# Altium schematic symbol library MyLibrary.SCHLIB: 89 symbols (part 2 of 3)
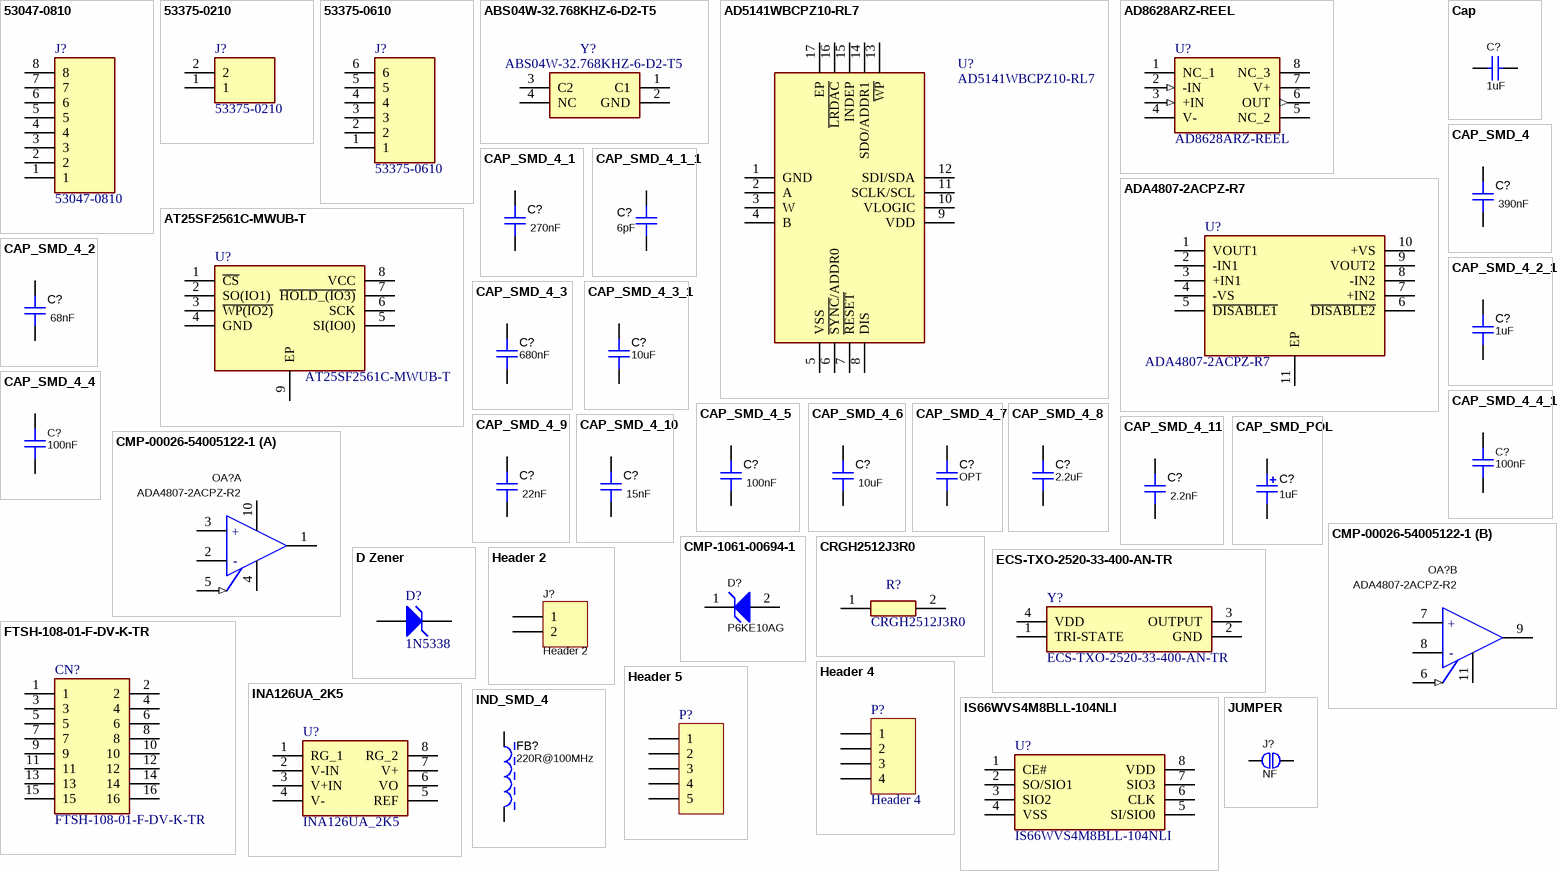
[diagram p3: symbols 53047-0810 to JUMPER]

## D Zener
designator D?, comment 1N5338
Zener Diode Single 5.1V 5% 1.5Ohm 5000mW 2-Pin Case 017AA-01 T/R / DIODE ZENER 5.1V 5W AXIAL; Manufacturer: onsemi; Manufacturer Part Number: 1N5338BRLG; Manufacturer Lifecycle Status: ACTIVE; ESD Protection: Yes; Forward Voltage: 1.2V; Impedance: 1.5Ω; Material: Plastic; Max Reverse Leakage Current: 1µA; Number of Elements: 1; Polarity: Unidirectional; Test Current: 240mA; Published: 8-Jun-2000; LatestRevisionDate: 17-Jul-2002; LatestRevisionNote: Re-released for DXP Platform.; PackageReference: DIODE-0.7; Publisher: Altium Limited; PackageDescription: Diode, Thru-Hole; 2 Leads; 0.7 in Pin Spacing; Value: 1N5338; Supplier 1: Mouser; Supplier Part Number 1: 863-1N5338BRLG; RoHS: Compliant; Category: Zener Diodes; Stock 1: 48065; Pricing 1: 1=0,53, 10=0,417, 50=0,417, 100=0,277, 1000=0,168, 10000=0,15 (USD); Case/Package: Axial; China RoHS: Non-Compliant; Contact Plating: Tin; Element Configuration: Single; Halogen Free: Halogen Free; Height: 3.68mm; Lead Free: Lead Free; Length: 8.89mm; Lifecycle Status: Production; Max Operating Temperature: 200°C; Max Power Dissipation: 5W; Min Operating Temperature: -65°C; Number of Pins: 0; Number of Terminals: 2; Packaging: Tape and Reel; Peak Reverse Current: 1µA; Power Dissipation: 5W; Power Rating: 5W; Radiation Hardening: No; REACH SVHC: No; Reference Voltage: 5.1V; Schedule B: 8541100050, 8541100050|8541100050|8541100050|8541100050|8541100050|8541100050|8541100050|8541100050|8541100050|8541100050|8541100050|8541100050|8541100050|8541100050|8541100050|8541100050|8541100050|8541100050|8541100050|8541100050|8541100050|8541100050|8541100050|85; Tolerance: 5%; Voltage Rating (DC): 5.1V; Voltage Tolerance: 5%; Width: 3.68mm; Working Voltage: 5.1V; Zener Current: 240mA; Zener Voltage: 5.1V; ComponentLink1URL: https://datasheet.octopart.com:443/1N5338BRLG-ON-Semiconductor-datasheet-141916626.pdf?src-supplier=Upverter; ComponentLink1Description: https://datasheet.octopart.com:443/1N5338BRLG-ON-Semiconductor-datasheet-141916626.pdf?src-supplier=Upverter; ComponentLink2URL: https://datasheet.octopart.com:443/1N5338BRLG-ON-Semiconductor-datasheet-33006776.pdf?src-supplier=Farnell; ComponentLink2Description: https://datasheet.octopart.com:443/1N5338BRLG-ON-Semiconductor-datasheet-33006776.pdf?src-supplier=Farnell; ComponentLink3URL: https://datasheet.octopart.com:443/1N5338BRLG-ON-Semiconductor-datasheet-153439.pdf?src-supplier=Farnell; ComponentLink3Description: https://datasheet.octopart.com:443/1N5338BRLG-ON-Semiconductor-datasheet-153439.pdf?src-supplier=Farnell; ComponentLink4URL: https://datasheet.octopart.com:443/1N5338BRLG-ON-Semiconductor-datasheet-10978983.pdf?src-supplier=Newark; ComponentLink4Description: https://datasheet.octopart.com:443/1N5338BRLG-ON-Semiconductor-datasheet-10978983.pdf?src-supplier=Newark; ComponentLink5URL: https://datasheet.octopart.com:443/1N5338BRLG-ON-Semiconductor-datasheet-10855185.pdf?src-supplier=Newark; ComponentLink5Description: https://datasheet.octopart.com:443/1N5338BRLG-ON-Semiconductor-datasheet-10855185.pdf?src-supplier=Newark; ComponentLink6URL: https://datasheet.octopart.com:443/1N5338BRLG-onsemi-datasheet-188912620.pdf?src-supplier=TME; ComponentLink6Description: https://datasheet.octopart.com:443/1N5338BRLG-onsemi-datasheet-188912620.pdf?src-supplier=TME; ComponentLink7URL: https://datasheet.octopart.com:443/1N5338BRLG-ON-Semiconductor-datasheet-149505804.pdf?src-supplier=TME; ComponentLink7Description: https://datasheet.octopart.com:443/1N5338BRLG-ON-Semiconductor-datasheet-149505804.pdf?src-supplier=TME; ComponentLink8URL: https://datasheet.octopart.com:443/1N5338BRLG-ON-Semiconductor-datasheet-102832425.pdf?src-supplier=TME; ComponentLink8Description: https://datasheet.octopart.com:443/1N5338BRLG-ON-Semiconductor-datasheet-102832425.pdf?src-supplier=TME; ComponentLink9URL: https://datasheet.octopart.com:443/1N5338BRLG-ON-Semiconductor-datasheet-49899566.pdf?src-supplier=TME; ComponentLink9Description: https://datasheet.octopart.com:443/1N5338BRLG-ON-Semiconductor-datasheet-49899566.pdf?src-supplier=TME; ComponentLink10URL: https://datasheet.octopart.com:443/1N5338BRLG-ON-Semiconductor-datasheet-14051315.pdf?src-supplier=iiiC; ComponentLink10Description: https://datasheet.octopart.com:443/1N5338BRLG-ON-Semiconductor-datasheet-14051315.pdf?src-supplier=iiiC; ComponentLink11URL: https://datasheet.octopart.com:443/1N5338BRLG-ON-Semiconductor-datasheet-8443898.pdf?src-supplier=Jameco; ComponentLink11Description: https://datasheet.octopart.com:443/1N5338BRLG-ON-Semiconductor-datasheet-8443898.pdf?src-supplier=Jameco; ComponentLink12URL: http://sigma.octopart.com:80/15540786/rohs_certificate/ON-Semiconductor-1N5338BRLG.pdf?src-supplier=Compliance+Statements; ComponentLink12Description: http://sigma.octopart.com:80/15540786/rohs_certificate/ON-Semiconductor-1N5338BRLG.pdf?src-supplier=Compliance+Statements; ComponentLink13URL: http://sigma.octopart.com:80/15672913/materials_sheet/ON-Semiconductor-1N5338BRLG.csv?src-supplier=Compliance+Statements; ComponentLink13Description: http://sigma.octopart.com:80/15672913/materials_sheet/ON-Semiconductor-1N5338BRLG.csv?src-supplier=Compliance+Statements; ComponentLink14URL: http://sigma.octopart.com:80/150599440/rohs_statement/ON-Semiconductor-1N5338BRLG.pdf?src-supplier=Compliance+Statements; ComponentLink14Description: http://sigma.octopart.com:80/150599440/rohs_statement/ON-Semiconductor-1N5338BRLG.pdf?src-supplier=Compliance+Statements; ComponentLink15URL: http://sigma.octopart.com:80/reach_statement/ON-Semiconductor-company-79.pdf?src-supplier=Compliance+Statements; ComponentLink15Description: http://sigma.octopart.com:80/reach_statement/ON-Semiconductor-company-79.pdf?src-supplier=Compliance+Statements; ComponentLink16URL: https://octopart.com:443/opatz8j6/c1?t=K8rBGNeouL0zwBtyYOUG5N71wPvmDNa5IjWm906t1egHOE71K4N3W58dg8p-4n0NRo6ZVym7LEVoeadKhCj_KAIV1VBU1nxok4Fmc62H7iZZeIjKc1AzSx9eEqnCna-SvkHrpmeWi6KyFNZB_ar1VQKSgFr4suu3lOvvhthpVNjuTXy7Nyg0mopVAvv_54SNVBMRgVWhfZHkVT7No4bFkOJbuYGOroahAKEfKVW6CdLxptFYFKKszIVc17iqCcMUhiv329-GgCYdixihsDiGyrrCNzQGQ9jisGSjOf19m6693ZHoxNN8_8wq-aTdUjIhLN-4IKPFZw9bnSu57QtytDi4e-ETF9L5jw&src-supplier=Compliance+Statements; ComponentLink16Description: https://octopart.com:443/opatz8j6/c1?t=K8rBGNeouL0zwBtyYOUG5N71wPvmDNa5IjWm906t1egHOE71K4N3W58dg8p-4n0NRo6ZVym7LEVoeadKhCj_KAIV1VBU1nxok4Fmc62H7iZZeIjKc1AzSx9eEqnCna-SvkHrpmeWi6KyFNZB_ar1VQKSgFr4suu3lOvvhthpVNjuTXy7Nyg0mopVAvv_54SNVBMRgVWhfZHkVT7No4bFkOJbuYGOroahAKEfKVW6CdLxptFYFKKszIVc17iqCcMUhiv329-GgCYdixihsDiGyrrCNzQGQ9jisGSjOf19m6693ZHoxNN8_8wq-aTdUjIhLN-4IKPFZw9bnSu57QtytDi4e-ETF9L5jw&src-supplier=Compliance+Statements; ComponentLink17URL: https://octopart.com:443/opatz8j6/c1?t=RhFLWENlDnzBMbVnooHMkHFlSkBOaZ4lus4D9Tl4_4nrqq02U6elMfbu_WDTzm1F6LkRnquxqIyvos-92R-JRY31CJ0R7iQpP-4mNjrAlQ8sJskUcWmhg9qKP4ouvRm2CI8KqAkj4kZ6HHBtK3q2DXgL2fKmcjar7FZsELBGceltgSf-BXxPbqJnRdje9W-YgufrDH3xhYAIbdi_eD1wo0yl4Z6z04Q1iLUuJmpzYms07A0afMo-OslVWwH7s3oveDBUxzYzQ43cQQMy1icYWuJAfMYAKgsu_joBcuDluPtmKKPX90cnCPN_AicH5FVwPYCd3LUV1rOIzvzEriwx9gwR2svOwXyuBq0&src-supplier=Compliance+Statements; ComponentLink17Description: https://octopart.com:443/opatz8j6/c1?t=RhFLWENlDnzBMbVnooHMkHFlSkBOaZ4lus4D9Tl4_4nrqq02U6elMfbu_WDTzm1F6LkRnquxqIyvos-92R-JRY31CJ0R7iQpP-4mNjrAlQ8sJskUcWmhg9qKP4ouvRm2CI8KqAkj4kZ6HHBtK3q2DXgL2fKmcjar7FZsELBGceltgSf-BXxPbqJnRdje9W-YgufrDH3xhYAIbdi_eD1wo0yl4Z6z04Q1iLUuJmpzYms07A0afMo-OslVWwH7s3oveDBUxzYzQ43cQQMy1icYWuJAfMYAKgsu_joBcuDluPtmKKPX90cnCPN_AicH5FVwPYCd3LUV1rOIzvzEriwx9gwR2svOwXyuBq0&src-supplier=Compliance+Statements
footprint DIOAD2260W109L864D349
simulation model ZENER (Diode)
signal-integrity model D Zener
pins: 1 A, 2 K

## ECS-TXO-2520-33-400-AN-TR
designator Y?
Crystal or Oscillator; Manufacturer_Name: ECS; Datasheet Link: https://www.ecsxtal.com/store/pdf/ECS-TXO-2520.pdf; Height: 1mm; Manufacturer_Part_Number: ECS-TXO-2520-33-400-AN-TR; Mouser Part Number: 520-T2520-33-400-ANT; Mouser Price/Stock: https://www.mouser.co.uk/ProductDetail/ECS/ECS-TXO-2520-33-400-AN-TR?qs=KAq9QXcE8HByYoA9pqyoqQ%3D%3D; Arrow Part Number: ECS-TXO-2520-33-400-AN-TR; Arrow Price/Stock: https://www.arrow.com/en/products/ecs-txo-2520-33-400-an-tr/ecs-international
footprint ECSTXO252033400ANTR
pins: 1 TRI-STATE, 2 GND, 3 OUTPUT, 4 VDD

## FTSH-108-01-F-DV-K-TR
designator CN?
Connector; Manufacturer_Name: SAMTEC; Datasheet Link: http://suddendocs.samtec.com/prints/ftsh-1xx-xx-xxx-dv-xxx-xxx-mkt.pdf; Manufacturer_Part_Number: FTSH-108-01-F-DV-K-TR; Mouser Part Number: 200-FTSH10801FDVKTR; Mouser Price/Stock: https://www.mouser.co.uk/ProductDetail/Samtec/FTSH-108-01-F-DV-K-TR?qs=Cqqh%252BS766wlokNcbbljbTA%3D%3D; Arrow Part Number: FTSH-108-01-F-DV-K-TR; Arrow Price/Stock: https://www.arrow.com/en/products/ftsh-108-01-f-dv-k-tr/samtec
footprint FTSH-108-XX-YYY-DV-K-TR
pins: 1, 2, 3, 4, 5, 6, 7, 8, 9, 10, 11, 12, 13, 14, 15, 16

## Header 2
designator J?
Header, 2-Pin; LatestRevisionDate: 17-Jul-2002; LatestRevisionNote: Re-released for DXP Platform.; Publisher: Altium Limited
footprint HDR1X2 (Connector; Header; 2 Position)
signal-integrity model Connector
pins: 1, 2

## Header 4
designator P?
Header, 4-Pin; LatestRevisionDate: 17-Jul-2002; LatestRevisionNote: Re-released for DXP Platform.; Publisher: Altium Limited
footprint HDR1X4 (Connector; Header; 4 Position)
signal-integrity model Connector
pins: 1, 2, 3, 4

## Header 5
designator P?  (value not drawn)
Header, 5-Pin; LatestRevisionDate: 17-Jul-2002; LatestRevisionNote: Re-released for DXP Platform.; Publisher: Altium Limited
footprint HDR1X5 (Connector; Header; 5 Position)
signal-integrity model Connector
pins: 1, 2, 3, 4, 5

## INA126UA_2K5
designator U?
Integrated Circuit; Manufacturer_Name: Texas Instruments; Manufacturer_Part_Number: INA126UA/2K5; Datasheet Link: http://www.ti.com/lit/gpn/ina126; Height: 1.75mm; Mouser Part Number: 595-INA126UA/2K5; Mouser Price/Stock: https://www.mouser.co.uk/ProductDetail/Texas-Instruments/INA126UA-2K5?qs=VBduBm9rCJTGiMrMFuOlgg%3D%3D; Arrow Part Number: INA126UA/2K5; Arrow Price/Stock: https://www.arrow.com/en/products/ina126ua2k5/texas-instruments?region=nac
footprint SOIC127P600X175-8N
pins: 1 RG_1, 2 V-IN, 3 V+IN, 4 V-, 5 REF, 6 VO, 7 V+, 8 RG_2

## IND_SMD_4
designator FB?, comment value 220R@100MHz  (hidden comment: Bead)
Ferrite Bead SMD 1608mm (0603) 220Ohms @ 100MHz 200mA 25%; Manufacturer 1: Murata; Manufacturer Part Number 1: BLM18RK221SN1D; Material: Ferrite,Steel; DC Resistance (DCR): 300mR; Number of Lines: 1; Shielding: Unshielded; Impedance: 220R; Category: Inductor SMD; ComponentLink1Description: Manufacturer 1 Product Page; ComponentLink1URL: https://www.murata.com/en-us/products/productdetail?partno=BLM18RK221SN1%23; ComponentLink2Description: Manufacturer 1 Product Datasheet 1; ComponentLink2URL: https://www.murata.com/en-us/api/pdfdownloadapi?cate=cgsubChipFerriBead&partno=BLM18RK221SN1%23; ComponentLink3Description: Supplier 1 Product Page; ComponentLink3URL: https://www.mouser.com/ProductDetail/Murata-Electronics/BLM18RK221SN1D?qs=%2Fha2pyFadug5NtL6n1y3hLHf5g6TCmIZQXwj5getGlkGClGgK%2FxDSg%3D%3D; ComponentLink4Description: Supplier 1 Product Datasheet 1; ComponentLink4URL: https://www.mouser.com/datasheet/2/281/ENFA0003-1915778.pdf; Supplier 1: Mouser; Supplier Part Number 1: 81-BLM18RK221SN1D; Number of Pins: 2; Case Code (Metric): 1608; Case Code (Imperial): 0603; Weight: 7.1E-05oz; Contact Plating: Tin,Matte; Min Operating Temperature: -55°C; Max Operating Temperature: 125°C; Packaging: Tape and Reel; Current Rating: 200mA; Number of Circuits: 1; Tolerance: 25%; Package Quantity: 1; Max Current Rating: 200mA; Termination: Flat; Max DC Current: 200mA; Test Frequency: 100MHz; Length: 1.6mm; Width: 0.8mm; Depth: 0.8mm; REACH SVHC: No SVHC; Lead Free: Lead Free; Manufacturer: Murata; Manufacturer Part Number: BLM18RK221SN1D; ComponentLink5Description: Manufacturer 2 Product Page; ComponentLink6Description: Manufacturer 2 Product Datasheet 1; ComponentLink7Description: Supplier 2 Product Page; ComponentLink8Description: Supplier 2 Product Datasheet 1
footprint BLM18RK221SN1D
pins: 1, 2

## IS66WVS4M8BLL-104NLI
designator U?
Integrated Circuit; Manufacturer_Name: Integrated Silicon Solution Inc.; Datasheet Link: https://www.issi.com/WW/pdf/66-67WVS4M8ALL-BLL.pdf; Height: 1.75mm; Manufacturer_Part_Number: IS66WVS4M8BLL-104NLI; Mouser Part Number: 870-ISS4M8BLL-104NLI; Mouser Price/Stock: https://www.mouser.co.uk/ProductDetail/ISSI/IS66WVS4M8BLL-104NLI?qs=doiCPypUmgHfByEUFkOsAw%3D%3D; Arrow Part Number: IS66WVS4M8BLL-104NLI; Arrow Price/Stock: https://www.arrow.com/en/products/is66wvs4m8bll-104nli/integrated-silicon-solution-inc?region=nac
footprint SOIC127P600X175-8N
pins: 1 CE#, 2 SO/SIO1, 3 SIO2, 4 VSS, 5 SI/SIO0, 6 CLK, 7 SIO3, 8 VDD

## JUMPER
designator J?, comment value NF  (hidden comment: Jumper Solder)  (no BOM)
Jumper Solder 1x1 mm; Category: Jumper Solder; Description PT-BR: Description PT-BR
footprint JP01.0x01.0 (Solder Jumper 01.0 x 01.0 mm Ball)
footprint JP01.5x01.5 (Solder Jumper 01.5 x 01.5 mm Ball)
footprint JP02.0X02.0 (Solder Jumper 02.0 x 02.0 mm Ball)
pins: 1, 2

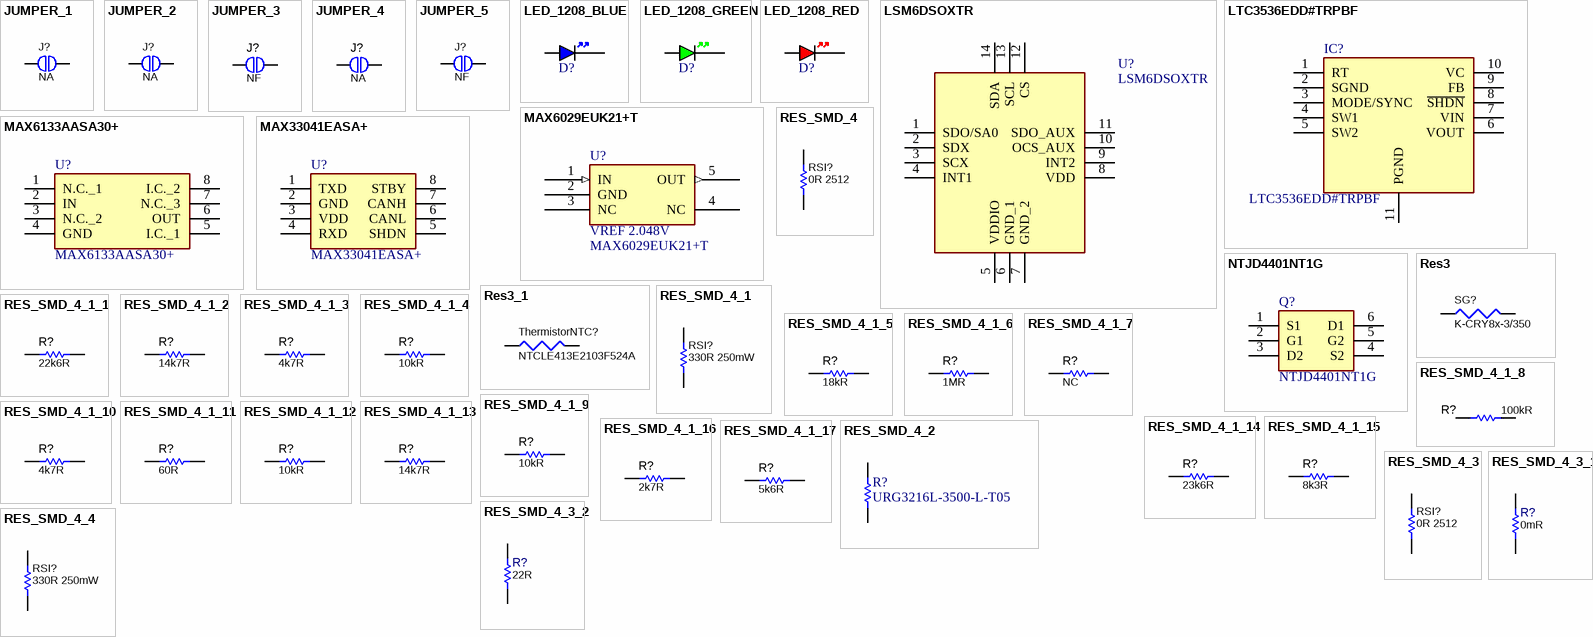
[diagram p1: symbols JUMPER_1 to RES_SMD_4_4]

## JUMPER_1
designator J?, comment value NA  (hidden comment: Jumper Solder)  (no BOM)
Jumper Solder 1x1 mm; Category: Jumper Solder; Description PT-BR: Description PT-BR
footprint JP01.0x01.0 (Solder Jumper 01.0 x 01.0 mm Ball)
footprint JP01.5x01.5 (Solder Jumper 01.5 x 01.5 mm Ball)
footprint JP02.0X02.0 (Solder Jumper 02.0 x 02.0 mm Ball)
pins: 1, 2

## JUMPER_2
designator J?, comment value NA  (hidden comment: Jumper Solder)  (no BOM)
Jumper Solder 1x1 mm; Category: Jumper Solder; Description PT-BR: Description PT-BR
footprint JP01.0x01.0 (Solder Jumper 01.0 x 01.0 mm Ball)
footprint JP01.5x01.5 (Solder Jumper 01.5 x 01.5 mm Ball)
footprint JP02.0X02.0 (Solder Jumper 02.0 x 02.0 mm Ball)
pins: 1, 2

## JUMPER_3
designator J?, comment value NF  (hidden comment: Jumper Solder 1x1 mm)  (no BOM)
Manufacturer: na; Manufacturer Part Number: na; ComponentLink2Description: Manufacturer 1 Product Datasheet 1; ComponentLink4Description: Supplier 1 Product Datasheet 1; ComponentLink5Description: Manufacturer 2 Product Page; ComponentLink6Description: Manufacturer 2 Product Datasheet 1; ComponentLink7Description: Supplier 2 Product Page; ComponentLink8Description: Supplier 2 Product Datasheet 1; ComponentLink1Description: Manufacturer 1 Product Page; ComponentLink3Description: Supplier 1 Product Page
footprint JP01.5X01.5 (Solder Jumper 01.5 x 01.5 mm Ball)
footprint JP01.0X01.0 (Solder Jumper 01.0 x 01.0 mm Ball)
pins: 1, 2

## JUMPER_4
designator J?, comment value NA  (hidden comment: Jumper Solder 1x1 mm)  (no BOM)
Manufacturer: na; Manufacturer Part Number: na; ComponentLink2Description: Manufacturer 1 Product Datasheet 1; ComponentLink4Description: Supplier 1 Product Datasheet 1; ComponentLink5Description: Manufacturer 2 Product Page; ComponentLink6Description: Manufacturer 2 Product Datasheet 1; ComponentLink7Description: Supplier 2 Product Page; ComponentLink8Description: Supplier 2 Product Datasheet 1; ComponentLink1Description: Manufacturer 1 Product Page; ComponentLink3Description: Supplier 1 Product Page
footprint JP01.5X01.5 (Solder Jumper 01.5 x 01.5 mm Ball)
footprint JP01.0X01.0 (Solder Jumper 01.0 x 01.0 mm Ball)
pins: 1, 2

## JUMPER_5
designator J?, comment value NF  (hidden comment: Jumper Solder)  (no BOM)
Jumper Solder 1x1 mm; Category: Jumper Solder; Description PT-BR: Description PT-BR
footprint JP01.0x01.0 (Solder Jumper 01.0 x 01.0 mm Ball)
footprint JP01.5x01.5 (Solder Jumper 01.5 x 01.5 mm Ball)
footprint JP02.0X02.0 (Solder Jumper 02.0 x 02.0 mm Ball)
pins: 1, 2

## LED_1208_BLUE
designator D?, comment BLUE  (value not drawn)
LED 1208 BLUE SMD
footprint LEDM3020X150N
pins: A, K

## LED_1208_GREEN
designator D?, comment GREEN  (value not drawn)
LED 1208 GREEN SMD
footprint LEDM3020X150N
pins: A, K

## LED_1208_RED
designator D?, comment RED  (value not drawn)
LED 1208 RED SMD
footprint LEDM3020X150N
pins: A, K

## LSM6DSOXTR
designator U?
Accelerometer; Manufacturer_Name: STMicroelectronics; Datasheet Link: https://www.st.com/resource/en/datasheet/lsm6dsox.pdf; Manufacturer_Part_Number: LSM6DSOXTR; Mouser Part Number: 511-LSM6DSOXTR; Mouser Price/Stock: https://www.mouser.co.uk/ProductDetail/STMicroelectronics/LSM6DSOXTR?qs=l7cgNqFNU1i9dcjzItLpVQ%3D%3D; Arrow Part Number: LSM6DSOXTR; Arrow Price/Stock: https://www.arrow.com/en/products/lsm6dsoxtr/stmicroelectronics?utm_currency=USD&region=europe
footprint LGA-14_1
pins: 1 SDO/SA0, 2 SDX, 3 SCX, 4 INT1, 5 VDDIO, 6 GND_1, 7 GND_2, 8 VDD, 9 INT2, 10 OCS_AUX, 11 SDO_AUX, 12 CS, 13 SCL, 14 SDA

## LTC3536EDD#TRPBF
designator IC?
Integrated Circuit; Manufacturer_Name: Analog Devices; Datasheet Link: http://www.linear.com/docs/40104; Height: 0.8mm; Manufacturer_Part_Number: LTC3536EDD#TRPBF; Mouser Part Number: 584-LTC3536EDD#TRPBF; Mouser Price/Stock: https://www.mouser.co.uk/ProductDetail/Analog-Devices/LTC3536EDDTRPBF?qs=hVkxg5c3xu%252B96mqZ%252BCaF%2FQ%3D%3D; Arrow Part Number: LTC3536EDD#TRPBF; Arrow Price/Stock: https://www.arrow.com/en/products/ltc3536eddtrpbf/analog-devices?region=nac
footprint SON50P300X300X80-11N-D
pins: 1 RT, 2 SGND, 3 MODE/SYNC, 4 SW1, 5 SW2, 6 VOUT, 7 VIN, 8 ~{SHDN}, 9 FB, 10 VC, 11 PGND

## MAX6029EUK21+T
designator U?, comment VREF 2.048V  value MAX6029EUK21+T
Voltage Reference SOT23-5 2.048V 0.15% 30ppm/oC; Manufacturer 1: Maxim; Max Input Voltage: 13V; Max Output Current: 4mA; Number of Channels: 1; Temperature Coefficient: 30ppm/°C; Operating Supply Current: 5.25uA; Reference Type: Series; Output Type: Fixed; Supplier 1: Mouser; Manufacturer Part Number 1: MAX6029EUK21+T; Supplier Part Number 1: 700-MAX6029EUK21T; ComponentLink1Description: Manufacturer 1 Product Page; ComponentLink1URL: https://www.maximintegrated.com/en/products/orderpage.html?fert=MAX6029EUK21%2BT; ComponentLink2Description: Manufacturer 1 Product Dataheet 1; ComponentLink2URL: https://datasheets.maximintegrated.com/en/ds/MAX6029.pdf; ComponentLink3Description: Supplier 1 Product Page; ComponentLink3URL: https://br.mouser.com/ProductDetail/Maxim-Integrated/MAX6029EUK21%2bT?qs=1THa7WoU59EmCT%252Bpj0wYGg%3D%3D; ComponentLink4Description: Supplier 1 Product Datasheet 1; ComponentLink4URL: https://br.mouser.com/datasheet/2/256/MAX6029-1515722.pdf; Manufacturer: Maxim; Manufacturer Part Number: MAX6029EUK21+T; RoHS: Yes; Mount: Surface Mount; Case/Package: SOT-23-5; Number of Pins: 5; Min Operating Temperature: -40°C; Max Operating Temperature: 85°C; Output Voltage: 2.048V; Packaging: Tape and Reel; Package Quantity: 2500; Tolerance: 0.15%; Min Output Voltage: 2.048V; Output Current: 4mA; Quiescent Current: 5.25uA; Reference Voltage: 2.048V; Radiation Hardening: No; REACH SVHC: Unknown; Lead Free: Lead Free; Description - Short: VREF 2.048V; Manufacturer Product Datasheet: https://datasheets.maximintegrated.com/en/ds/MAX6029.pdf; Manufacturer Product Page: https://www.maximintegrated.com/en/products/orderpage.html?fert=MAX6029EUK21%2BT; Manufacturer 1 Product Datasheet 1: https://datasheets.maximintegrated.com/en/ds/MAX6029.pdf; Manufacturer 1 Product Page: https://www.maximintegrated.com/en/products/orderpage.html?fert=MAX6029EUK21%2BT
footprint SOT23-5BN (SOT23, 5-Leads, Body 2.9x1.6mm, Pitch 0.95mm, Lead Span 2.8mm, IPC Medium Density)
pins: 1 IN (in), 2 GND (power), 3 NC (power), 4 NC (power), 5 OUT (out)

## MAX6133AASA30+
designator U?
Integrated Circuit; Manufacturer_Name: Analog Devices; Datasheet Link: https://datasheets.maximintegrated.com/en/ds/MAX6133.pdf; Height: 1.75mm; Manufacturer_Part_Number: MAX6133AASA30+; Mouser Part Number: 700-MAX6133AASA30; Mouser Price/Stock: https://www.mouser.co.uk/ProductDetail/Analog-Devices-Maxim-Integrated/MAX6133AASA30%2b?qs=GxOUx7aO6nyv30CC68z1PQ%3D%3D; Arrow Part Number: MAX6133AASA30+; Arrow Price/Stock: https://www.arrow.com/en/products/max6133aasa30/maxim-integrated?region=nac
footprint SOIC127P600X175-8N
pins: 1 N.C._1, 2 IN, 3 N.C._2, 4 GND, 5 I.C._1, 6 OUT, 7 N.C._3, 8 I.C._2

## MAX33041EASA+
designator U?
Integrated Circuit; Manufacturer_Name: Analog Devices; Datasheet Link: https://datasheets.maximintegrated.com/en/ds/MAX33040E-MAX33041E.pdf; Height: 1.75mm; Manufacturer_Part_Number: MAX33041EASA+; Mouser Part Number: 700-MAX33041EASA+; Mouser Price/Stock: https://www.mouser.co.uk/ProductDetail/Analog-Devices-Maxim-Integrated/MAX33041EASA%2b?qs=7D1LtPJG0i1o%2FBQmtmARLg%3D%3D; Arrow Part Number: MAX33041EASA+; Arrow Price/Stock: https://www.arrow.com/en/products/max33041easa/analog-devices?region=nac
footprint SOIC127P600X175-8N
pins: 1 TXD, 2 GND, 3 VDD, 4 RXD, 5 SHDN, 6 CANL, 7 CANH, 8 STBY

## NTJD4401NT1G
designator Q?
Transistor; Manufacturer_Name: onsemi; Datasheet Link: https://www.onsemi.com/pub/Collateral/NTJD4401N-D.PDF; Height: 1.1mm; Manufacturer_Part_Number: NTJD4401NT1G; Mouser Part Number: 863-NTJD4401NT1G; Mouser Price/Stock: https://www.mouser.co.uk/ProductDetail/onsemi/NTJD4401NT1G?qs=ZXBb0xZ9WeB4HLOsowzYFA%3D%3D; Arrow Part Number: NTJD4401NT1G; Arrow Price/Stock: https://www.arrow.com/en/products/ntjd4401nt1g/on-semiconductor
footprint SOT65P210X110-6N
pins: 1 S1, 2 G1, 3 D2, 4 S2, 5 G2, 6 D1

## Res3
designator SG?, comment K-CRY8x-3/350  (mechanical)
Strain Gauge 350 Ohms 5.5 Vmax Geometry: Y rosette with connection cables
footprint J1-0603 (Chip Resistor, Body 1.6x0.8mm, IPC High Density)
footprint 14-1210 (Chip Resistor, Body 3.2x2.5mm, IPC High Density)
footprint 12Z-2010 (Chip Resistor, Body 5.0x2.5mm, IPC High Density)
footprint RESC6332 (Chip Resistor, Body 6.3x3.2mm, IPC High Density)
simulation model RESISTOR (Resistor)
signal-integrity model Res
pins: 1, 2

## Res3_1
designator ThermistorNTC?, comment NTCLE413E2103F524A  (mechanical)
Vishay / BC Components - NTCLE413E2103F524A - 10KR; Published: 8-Jun-2000; LatestRevisionDate: 29-May-2009; LatestRevisionNote: IPC-7351 Footprint Added.; PackageReference: J1-0603; Publisher: Altium Limited; PackageDescription: Chip Resistor; Websitelink: https://www.hbm.com/pt/4550/strain-gauges-pre-cabeados/?product_type_no=Strain%20gauges%20pr%C3%A9-cabeados; Manufacturer: Vishay; Manufacturer Part Number: NTCLE413E2103F524A
footprint J1-0603 (Chip Resistor, Body 1.6x0.8mm, IPC High Density)
footprint 14-1210 (Chip Resistor, Body 3.2x2.5mm, IPC High Density)
footprint 12Z-2010 (Chip Resistor, Body 5.0x2.5mm, IPC High Density)
footprint RESC6332 (Chip Resistor, Body 6.3x3.2mm, IPC High Density)
simulation model RESISTOR (Resistor)
signal-integrity model Res
pins: 1, 2

## RES_SMD_4
designator RSI?, comment 0R 2512
Resistor SMD 6332mm (2512mil) 0Ohms 1W 5%; Manufacturer: Bourns; Manufacturer Part Number: CR2512-J/-000ELF; Value: =Resistance; ComponentLink1Description: Manufacturer 1 Product Page; ComponentLink1URL: k; ComponentLink2Description: Manufacturer 1 Product Datasheet 1; ComponentLink2URL: k; ComponentLink3Description: Supplier 1 Product Page; ComponentLink3URL: k; ComponentLink4Description: Supplier 1 Product Datasheet 1; ComponentLink4URL: k; Category: Resistor; Height: *
simulation model RESISTOR (Resistor)
signal-integrity model Res
footprint RESC1608M (Chip Resistor, Body 1.6x0.8mm, IPC Low Density)
footprint RESC0603M (Chip Resistor, Body 0.6x0.3mm, IPC Low Density)
footprint RESC1005M (Chip Resistor, Body 1.1x0.5mm, IPC Low Density)
footprint RESC2012M (Chip Resistor, Body 2.0x1.3mm, IPC Low Density)
footprint RESC3216M (Chip Resistor, Body 3.2x1.6mm, IPC Low Density)
footprint RESC3225M (Chip Resistor, Body 3.2x2.5mm, IPC Low Density)
footprint RESC4532M (Chip Resistor, Body 4.5x3.2mm, IPC Low Density)
footprint RESC5025M (Chip Resistor, Body 5.0x2.5mm, IPC Low Density)
footprint RESC6332M (Chip Resistor, Body 6.3x3.2mm, IPC Low Density)
footprint RESC1005N (Chip Resistor, Body 1.1x0.5mm, IPC Medium Density)
pins: 1, 2

## RES_SMD_4_1
designator RSI?, comment 330R 250mW
Resistor SMD 3216mm (1206mil) 330Ohms 250mW 1%; Manufacturer: YAGEO; Manufacturer Part Number: RT1206FRE07330RL; Value: =Resistance; ComponentLink1Description: Manufacturer 1 Product Page; ComponentLink1URL: k; ComponentLink2Description: Manufacturer 1 Product Datasheet 1; ComponentLink2URL: k; ComponentLink3Description: Supplier 1 Product Page; ComponentLink3URL: https://www.mouser.com/ProductDetail/YAGEO/RT1206FRE07330RL?qs=Fz%2FrpjPuTcGdAbr7NGqIFg%3D%3D; ComponentLink4Description: Supplier 1 Product Datasheet 1; ComponentLink4URL: https://www.mouser.com/datasheet/3/508/1/PYu-RT_1-to-0.01_RoHS_L_15.pdf; Category: Resistor; Height: *
simulation model RESISTOR (Resistor)
signal-integrity model Res
footprint RESC1608M (Chip Resistor, Body 1.6x0.8mm, IPC Low Density)
footprint RESC0603M (Chip Resistor, Body 0.6x0.3mm, IPC Low Density)
footprint RESC1005M (Chip Resistor, Body 1.1x0.5mm, IPC Low Density)
footprint RESC2012M (Chip Resistor, Body 2.0x1.3mm, IPC Low Density)
footprint RESC3216M (Chip Resistor, Body 3.2x1.6mm, IPC Low Density)
footprint RESC3225M (Chip Resistor, Body 3.2x2.5mm, IPC Low Density)
footprint RESC4532M (Chip Resistor, Body 4.5x3.2mm, IPC Low Density)
footprint RESC5025M (Chip Resistor, Body 5.0x2.5mm, IPC Low Density)
footprint RESC6332M (Chip Resistor, Body 6.3x3.2mm, IPC Low Density)
footprint RESC1005N (Chip Resistor, Body 1.1x0.5mm, IPC Medium Density)
pins: 1, 2

## RES_SMD_4_1_1
designator R?, comment value 22k6R  (hidden comment: 22k6 ohm 0.1%)
ComponentLink1Description: Manufacturer 1 Product Page; ComponentLink2Description: Manufacturer 1 Product Datasheet 1; ComponentLink3Description: Supplier 1 Product Page; ComponentLink4Description: Supplier 1 Product Datasheet 1; Category: Resistor; Supplier 1: Mouser; Resistance: 22k6R; ComponentLink5Description: Manufacturer 2 Product Page; ComponentLink6Description: Manufacturer 2 Product Datasheet 1; ComponentLink7Description: Supplier 2 Product Page; ComponentLink8Description: Supplier 2 Product Datasheet 1; ComponentLink5URL: k; ComponentLink6URL: k; ComponentLink7URL: k; ComponentLink8URL: k
simulation model RESISTOR (Resistor)
signal-integrity model Res
footprint RESC1608M (Chip Resistor, Body 1.6x0.8mm, IPC Low Density)
footprint RESC0603M (Footprint not found)
footprint RESC1005M (Footprint not found)
footprint RESC2012M (Chip Resistor, Body 2.0x1.3mm, IPC Low Density)
footprint RESC3216M (Chip Resistor, Body 3.2x1.6mm, IPC Low Density)
footprint RESC3225M (Chip Resistor, Body 3.2x2.5mm, IPC Low Density)
footprint RESC4532M (Chip Resistor, Body 4.5x3.2mm, IPC Low Density)
footprint RESC5025M (Chip Resistor, Body 5.0x2.5mm, IPC Low Density)
footprint RESC6332M (Chip Resistor, Body 6.3x3.2mm, IPC Low Density)
footprint RESC1005N
pins: 1, 2

## RES_SMD_4_1_2
designator R?, comment value 14k7R  (hidden comment: 14.7k ohm 0.1%)
ComponentLink1Description: Manufacturer 1 Product Page; ComponentLink2Description: Manufacturer 1 Product Datasheet 1; ComponentLink3Description: Supplier 1 Product Page; ComponentLink4Description: Supplier 1 Product Datasheet 1; Category: Resistor; Supplier 1: Mouser; Resistance: 14k7R; ComponentLink5Description: Manufacturer 2 Product Page; ComponentLink6Description: Manufacturer 2 Product Datasheet 1; ComponentLink7Description: Supplier 2 Product Page; ComponentLink8Description: Supplier 2 Product Datasheet 1; ComponentLink5URL: k; ComponentLink6URL: k; ComponentLink7URL: k; ComponentLink8URL: k
simulation model RESISTOR (Resistor)
signal-integrity model Res
footprint RESC1608M (Chip Resistor, Body 1.6x0.8mm, IPC Low Density)
footprint RESC0603M (Footprint not found)
footprint RESC1005M (Footprint not found)
footprint RESC2012M (Chip Resistor, Body 2.0x1.3mm, IPC Low Density)
footprint RESC3216M (Chip Resistor, Body 3.2x1.6mm, IPC Low Density)
footprint RESC3225M (Chip Resistor, Body 3.2x2.5mm, IPC Low Density)
footprint RESC4532M (Chip Resistor, Body 4.5x3.2mm, IPC Low Density)
footprint RESC5025M (Chip Resistor, Body 5.0x2.5mm, IPC Low Density)
footprint RESC6332M (Chip Resistor, Body 6.3x3.2mm, IPC Low Density)
footprint RESC1005N
pins: 1, 2

## RES_SMD_4_1_3
designator R?, comment value 4k7R  (hidden comment: 4.7k ohm 0.1%)
Manufacturer: Panasonic; Manufacturer Part Number: ERJ-PB6B4701V; ComponentLink1Description: Manufacturer 1 Product Page; ComponentLink2Description: Manufacturer 1 Product Datasheet 1; ComponentLink3Description: Supplier 1 Product Page; ComponentLink4Description: Supplier 1 Product Datasheet 1; Category: Resistor; Supplier 1: Mouser; Resistance: 4k7R; ComponentLink5Description: Manufacturer 2 Product Page; ComponentLink6Description: Manufacturer 2 Product Datasheet 1; ComponentLink7Description: Supplier 2 Product Page; ComponentLink8Description: Supplier 2 Product Datasheet 1; ComponentLink5URL: k; ComponentLink6URL: k; ComponentLink7URL: k; ComponentLink8URL: k
simulation model RESISTOR (Resistor)
signal-integrity model Res
footprint RESC1608M (Chip Resistor, Body 1.6x0.8mm, IPC Low Density)
footprint RESC0603M (Footprint not found)
footprint RESC1005M (Chip Resistor, Body 1.1x0.5mm, IPC Low Density)
footprint RESC2012M (Chip Resistor, Body 2.0x1.3mm, IPC Low Density)
footprint RESC3216M (Chip Resistor, Body 3.2x1.6mm, IPC Low Density)
footprint RESC3225M (Chip Resistor, Body 3.2x2.5mm, IPC Low Density)
footprint RESC4532M (Chip Resistor, Body 4.5x3.2mm, IPC Low Density)
footprint RESC5025M (Chip Resistor, Body 5.0x2.5mm, IPC Low Density)
footprint RESC6332M (Chip Resistor, Body 6.3x3.2mm, IPC Low Density)
footprint RESC1005N
pins: 1, 2

## RES_SMD_4_1_4
designator R?, comment value 10kR  (hidden comment: 10k ohm 0.1%)
ComponentLink1Description: Manufacturer 1 Product Page; ComponentLink2Description: Manufacturer 1 Product Datasheet 1; ComponentLink3Description: Supplier 1 Product Page; ComponentLink4Description: Supplier 1 Product Datasheet 1; Category: Resistor; Supplier 1: Mouser; Resistance: 10kR; ComponentLink5Description: Manufacturer 2 Product Page; ComponentLink6Description: Manufacturer 2 Product Datasheet 1; ComponentLink7Description: Supplier 2 Product Page; ComponentLink8Description: Supplier 2 Product Datasheet 1; ComponentLink5URL: k; ComponentLink6URL: k; ComponentLink7URL: k; ComponentLink8URL: k
simulation model RESISTOR (Resistor)
signal-integrity model Res
footprint RESC1608M (Chip Resistor, Body 1.6x0.8mm, IPC Low Density)
footprint RESC0603M (Footprint not found)
footprint RESC1005M (Footprint not found)
footprint RESC2012M (Chip Resistor, Body 2.0x1.3mm, IPC Low Density)
footprint RESC3216M (Chip Resistor, Body 3.2x1.6mm, IPC Low Density)
footprint RESC3225M (Chip Resistor, Body 3.2x2.5mm, IPC Low Density)
footprint RESC4532M (Chip Resistor, Body 4.5x3.2mm, IPC Low Density)
footprint RESC5025M (Chip Resistor, Body 5.0x2.5mm, IPC Low Density)
footprint RESC6332M (Chip Resistor, Body 6.3x3.2mm, IPC Low Density)
footprint RESC1005N
pins: 1, 2

## RES_SMD_4_1_5
designator R?, comment value 18kR  (hidden comment: 18k ohm 0.1%)
ComponentLink1Description: Manufacturer 1 Product Page; ComponentLink2Description: Manufacturer 1 Product Datasheet 1; ComponentLink3Description: Supplier 1 Product Page; ComponentLink4Description: Supplier 1 Product Datasheet 1; Category: Resistor; Resistance: 18kR; ComponentLink5Description: Manufacturer 2 Product Page; ComponentLink6Description: Manufacturer 2 Product Datasheet 1; ComponentLink7Description: Supplier 2 Product Page; ComponentLink8Description: Supplier 2 Product Datasheet 1; ComponentLink5URL: k; ComponentLink6URL: k; ComponentLink7URL: k; ComponentLink8URL: k
simulation model RESISTOR (Resistor)
signal-integrity model Res
footprint RESC1608M (Chip Resistor, Body 1.6x0.8mm, IPC Low Density)
footprint RESC0603M (Footprint not found)
footprint RESC1005M (Footprint not found)
footprint RESC2012M (Chip Resistor, Body 2.0x1.3mm, IPC Low Density)
footprint RESC3216M (Chip Resistor, Body 3.2x1.6mm, IPC Low Density)
footprint RESC3225M (Chip Resistor, Body 3.2x2.5mm, IPC Low Density)
footprint RESC4532M (Chip Resistor, Body 4.5x3.2mm, IPC Low Density)
footprint RESC5025M (Chip Resistor, Body 5.0x2.5mm, IPC Low Density)
footprint RESC6332M (Chip Resistor, Body 6.3x3.2mm, IPC Low Density)
footprint RESC1005N
pins: 1, 2

## RES_SMD_4_1_6
designator R?, comment value 1MR  (hidden comment: Resistor SMD 1005mm (0402mil) 1MOhms 62.5mW 1% 100ppm/oC 50V)
Category: Resistor; Resistance: 1MR
simulation model RESISTOR (Resistor)
signal-integrity model Res
footprint RESC1608M (Chip Resistor, Body 1.6x0.8mm, IPC Low Density)
footprint RESC0603M (Footprint not found)
footprint RESC1005M (Footprint not found)
footprint RESC2012M (Chip Resistor, Body 2.0x1.3mm, IPC Low Density)
footprint RESC3216M (Chip Resistor, Body 3.2x1.6mm, IPC Low Density)
footprint RESC3225M (Chip Resistor, Body 3.2x2.5mm, IPC Low Density)
footprint RESC4532M (Chip Resistor, Body 4.5x3.2mm, IPC Low Density)
footprint RESC5025M (Chip Resistor, Body 5.0x2.5mm, IPC Low Density)
footprint RESC6332M (Chip Resistor, Body 6.3x3.2mm, IPC Low Density)
footprint RESC1005N
pins: 1, 2

## RES_SMD_4_1_7
designator R?  value NC
ComponentLink1Description: Manufacturer 1 Product Page; ComponentLink2Description: Manufacturer 1 Product Datasheet 1; ComponentLink3Description: Supplier 1 Product Page; ComponentLink4Description: Supplier 1 Product Datasheet 1; Category: Resistor; Supplier 1: Mouser; Resistance: NC; ComponentLink5Description: Manufacturer 2 Product Page; ComponentLink6Description: Manufacturer 2 Product Datasheet 1; ComponentLink7Description: Supplier 2 Product Page; ComponentLink8Description: Supplier 2 Product Datasheet 1; ComponentLink5URL: k; ComponentLink6URL: k; ComponentLink7URL: k; ComponentLink8URL: k
simulation model RESISTOR (Resistor)
signal-integrity model Res
footprint RESC1608M (Chip Resistor, Body 1.6x0.8mm, IPC Low Density)
footprint RESC0603M (Footprint not found)
footprint RESC1005M (Footprint not found)
footprint RESC2012M (Chip Resistor, Body 2.0x1.3mm, IPC Low Density)
footprint RESC3216M (Chip Resistor, Body 3.2x1.6mm, IPC Low Density)
footprint RESC3225M (Chip Resistor, Body 3.2x2.5mm, IPC Low Density)
footprint RESC4532M (Chip Resistor, Body 4.5x3.2mm, IPC Low Density)
footprint RESC5025M (Chip Resistor, Body 5.0x2.5mm, IPC Low Density)
footprint RESC6332M (Chip Resistor, Body 6.3x3.2mm, IPC Low Density)
footprint RESC1005N
pins: 1, 2

## RES_SMD_4_1_8
designator R?, comment value 100kR  (hidden comment: Resistor SMD 1005mm (0402mil) 100KOhms 62.5mW 1% 100ppm/oC 50V)
Resistance: 100kR; Category: Resistor
simulation model RESISTOR (Resistor)
signal-integrity model Res
footprint RESC1608M (Chip Resistor, Body 1.6x0.8mm, IPC Low Density)
footprint RESC0603M (Footprint not found)
footprint RESC1005M (Footprint not found)
footprint RESC2012M (Chip Resistor, Body 2.0x1.3mm, IPC Low Density)
footprint RESC3216M (Chip Resistor, Body 3.2x1.6mm, IPC Low Density)
footprint RESC3225M (Chip Resistor, Body 3.2x2.5mm, IPC Low Density)
footprint RESC4532M (Chip Resistor, Body 4.5x3.2mm, IPC Low Density)
footprint RESC5025M (Chip Resistor, Body 5.0x2.5mm, IPC Low Density)
footprint RESC6332M (Chip Resistor, Body 6.3x3.2mm, IPC Low Density)
footprint RESC1005N
pins: 1, 2

## RES_SMD_4_1_9
designator R?, comment value 10kR  (hidden comment: Resistor SMD 1005mm (0402mil) 10KOhms 62.5mW 1% 100ppm/oC 50V)
Manufacturer 1: Vishay; Manufacturer Part Number 1: CRCW040210K0FKED; Temperature Coefficient: 100ppm/°C; Max Power Dissipation: 63mW; ComponentLink1Description: Manufacturer 1 Product Page; ComponentLink1URL: https://www.vishay.com/product?docid=20035; ComponentLink2Description: Manufacturer 1 Product Datasheet 1; ComponentLink2URL: https://www.vishay.com/docs/20035/dcrcwe3.pdf; ComponentLink3Description: Supplier 1 Product Page; ComponentLink3URL: https://www.mouser.com/ProductDetail/Vishay-Dale/CRCW040210K0FKED?qs=rlE3Te1NifyN3e8vvxacSw%3D%3D; ComponentLink4Description: Supplier 1 Product Datasheet 1; ComponentLink4URL: https://www.mouser.com/datasheet/2/427/dcrcwe3-1762152.pdf; Category: Resistor; Supplier 1: Mouser; Supplier Part Number 1: 71-CRCW0402-10K-E3; Mount: Surface Mount; Number of Pins: 2; Contact Plating: Tin; Case Code (Metric): 1005; Case Code (Imperial): 0402; Min Operating Temperature: -55°C; Max Operating Temperature: 155°C; Tolerance: 1%; Resistance: 10kR; Resistor Type: Thick Film; Power Rating: 62.5mW; Termination: SMD/SMT; Voltage Rating (DC): 50V; Number of Terminations: 2; Manufacturer: Vishay; Manufacturer Part Number: CRCW040210K0FKED; ComponentLink5Description: Manufacturer 2 Product Page; ComponentLink6Description: Manufacturer 2 Product Datasheet 1; ComponentLink7Description: Supplier 2 Product Page; ComponentLink8Description: Supplier 2 Product Datasheet 1; ComponentLink5URL: k; ComponentLink6URL: k; ComponentLink7URL: k; ComponentLink8URL: k; Manufacturer 1 Product Datasheet 1: https://www.vishay.com/docs/20035/dcrcwe3.pdf; Manufacturer 1 Product Page: https://www.vishay.com/product?docid=20035; Manufacturer 2: Vishay; Manufacturer Part Number 2: CRCW040210K0FKEDHP; Manufacturer Product Datasheet: https://www.vishay.com/docs/20035/dcrcwe3.pdf; Manufacturer Product Page: https://www.vishay.com/product?docid=20035
simulation model RESISTOR (Resistor)
signal-integrity model Res
footprint RESC1608M (Chip Resistor, Body 1.6x0.8mm, IPC Low Density)
footprint RESC0603M (Footprint not found)
footprint RESC1005M (Footprint not found)
footprint RESC2012M (Chip Resistor, Body 2.0x1.3mm, IPC Low Density)
footprint RESC3216M (Chip Resistor, Body 3.2x1.6mm, IPC Low Density)
footprint RESC3225M (Chip Resistor, Body 3.2x2.5mm, IPC Low Density)
footprint RESC4532M (Chip Resistor, Body 4.5x3.2mm, IPC Low Density)
footprint RESC5025M (Chip Resistor, Body 5.0x2.5mm, IPC Low Density)
footprint RESC6332M (Chip Resistor, Body 6.3x3.2mm, IPC Low Density)
footprint RESC1005N
pins: 1, 2

## RES_SMD_4_1_10
designator R?, comment value 4k7R  (hidden comment: Resistor SMD 1005mm (0402mil) 4K7Ohms 62.5mW 1% 100ppm/oC 50V)
Resistance: 4k7R
simulation model RESISTOR (Resistor)
signal-integrity model Res
footprint RESC1608M (Chip Resistor, Body 1.6x0.8mm, IPC Low Density)
footprint RESC0603M (Footprint not found)
footprint RESC1005M (Footprint not found)
footprint RESC2012M (Chip Resistor, Body 2.0x1.3mm, IPC Low Density)
footprint RESC3216M (Chip Resistor, Body 3.2x1.6mm, IPC Low Density)
footprint RESC3225M (Chip Resistor, Body 3.2x2.5mm, IPC Low Density)
footprint RESC4532M (Chip Resistor, Body 4.5x3.2mm, IPC Low Density)
footprint RESC5025M (Chip Resistor, Body 5.0x2.5mm, IPC Low Density)
footprint RESC6332M (Chip Resistor, Body 6.3x3.2mm, IPC Low Density)
footprint RESC1005N
pins: 1, 2

## RES_SMD_4_1_11
designator R?, comment value 60R  (hidden comment: Resistor SMD 1005mm (0402mil) 60Ohms 62.5mW 1% 100ppm/oC 50V)
Category: Resistor; Resistance: 60R
simulation model RESISTOR (Resistor)
signal-integrity model Res
footprint RESC1608M (Chip Resistor, Body 1.6x0.8mm, IPC Low Density)
footprint RESC0603M (Footprint not found)
footprint RESC1005M (Footprint not found)
footprint RESC2012M (Chip Resistor, Body 2.0x1.3mm, IPC Low Density)
footprint RESC3216M (Chip Resistor, Body 3.2x1.6mm, IPC Low Density)
footprint RESC3225M (Chip Resistor, Body 3.2x2.5mm, IPC Low Density)
footprint RESC4532M (Chip Resistor, Body 4.5x3.2mm, IPC Low Density)
footprint RESC5025M (Chip Resistor, Body 5.0x2.5mm, IPC Low Density)
footprint RESC6332M (Chip Resistor, Body 6.3x3.2mm, IPC Low Density)
footprint RESC1005N
pins: 1, 2

## RES_SMD_4_1_12
designator R?  value 10kR
ComponentLink1Description: Manufacturer 1 Product Page; ComponentLink2Description: Manufacturer 1 Product Datasheet 1; ComponentLink3Description: Supplier 1 Product Page; ComponentLink4Description: Supplier 1 Product Datasheet 1; Category: Resistor; Supplier 1: Mouser; Resistance: 10kR; ComponentLink5Description: Manufacturer 2 Product Page; ComponentLink6Description: Manufacturer 2 Product Datasheet 1; ComponentLink7Description: Supplier 2 Product Page; ComponentLink8Description: Supplier 2 Product Datasheet 1
simulation model RESISTOR (Resistor)
signal-integrity model Res
footprint RESC1608M (Chip Resistor, Body 1.6x0.8mm, IPC Low Density)
footprint RESC0603M (Footprint not found)
footprint RESC1005M (Footprint not found)
footprint RESC2012M (Chip Resistor, Body 2.0x1.3mm, IPC Low Density)
footprint RESC3216M (Chip Resistor, Body 3.2x1.6mm, IPC Low Density)
footprint RESC3225M (Chip Resistor, Body 3.2x2.5mm, IPC Low Density)
footprint RESC4532M (Chip Resistor, Body 4.5x3.2mm, IPC Low Density)
footprint RESC5025M (Chip Resistor, Body 5.0x2.5mm, IPC Low Density)
footprint RESC6332M (Chip Resistor, Body 6.3x3.2mm, IPC Low Density)
footprint RESC1005N
pins: 1, 2

## RES_SMD_4_1_13
designator R?, comment value 14k7R  (hidden comment: 14k7 ohm 0.1%)
ComponentLink1Description: Manufacturer 1 Product Page; ComponentLink2Description: Manufacturer 1 Product Datasheet 1; ComponentLink3Description: Supplier 1 Product Page; ComponentLink4Description: Supplier 1 Product Datasheet 1; Category: Resistor; Supplier 1: Mouser; Resistance: 14k7R; ComponentLink5Description: Manufacturer 2 Product Page; ComponentLink6Description: Manufacturer 2 Product Datasheet 1; ComponentLink7Description: Supplier 2 Product Page; ComponentLink8Description: Supplier 2 Product Datasheet 1; ComponentLink5URL: k; ComponentLink6URL: k; ComponentLink7URL: k; ComponentLink8URL: k
simulation model RESISTOR (Resistor)
signal-integrity model Res
footprint RESC1608M (Chip Resistor, Body 1.6x0.8mm, IPC Low Density)
footprint RESC0603M (Footprint not found)
footprint RESC1005M (Footprint not found)
footprint RESC2012M (Chip Resistor, Body 2.0x1.3mm, IPC Low Density)
footprint RESC3216M (Chip Resistor, Body 3.2x1.6mm, IPC Low Density)
footprint RESC3225M (Chip Resistor, Body 3.2x2.5mm, IPC Low Density)
footprint RESC4532M (Chip Resistor, Body 4.5x3.2mm, IPC Low Density)
footprint RESC5025M (Chip Resistor, Body 5.0x2.5mm, IPC Low Density)
footprint RESC6332M (Chip Resistor, Body 6.3x3.2mm, IPC Low Density)
footprint RESC1005N
pins: 1, 2

## RES_SMD_4_1_14
designator R?, comment value 23k6R  (hidden comment: 23k6 ohm 0.1%)
ComponentLink1Description: Manufacturer 1 Product Page; ComponentLink2Description: Manufacturer 1 Product Datasheet 1; ComponentLink3Description: Supplier 1 Product Page; ComponentLink4Description: Supplier 1 Product Datasheet 1; Category: Resistor; Supplier 1: Mouser; Resistance: 23k6R; ComponentLink5Description: Manufacturer 2 Product Page; ComponentLink6Description: Manufacturer 2 Product Datasheet 1; ComponentLink7Description: Supplier 2 Product Page; ComponentLink8Description: Supplier 2 Product Datasheet 1; ComponentLink5URL: k; ComponentLink6URL: k; ComponentLink7URL: k; ComponentLink8URL: k
simulation model RESISTOR (Resistor)
signal-integrity model Res
footprint RESC1608M (Chip Resistor, Body 1.6x0.8mm, IPC Low Density)
footprint RESC0603M (Footprint not found)
footprint RESC1005M (Footprint not found)
footprint RESC2012M (Chip Resistor, Body 2.0x1.3mm, IPC Low Density)
footprint RESC3216M (Chip Resistor, Body 3.2x1.6mm, IPC Low Density)
footprint RESC3225M (Chip Resistor, Body 3.2x2.5mm, IPC Low Density)
footprint RESC4532M (Chip Resistor, Body 4.5x3.2mm, IPC Low Density)
footprint RESC5025M (Chip Resistor, Body 5.0x2.5mm, IPC Low Density)
footprint RESC6332M (Chip Resistor, Body 6.3x3.2mm, IPC Low Density)
footprint RESC1005N
pins: 1, 2

## RES_SMD_4_1_15
designator R?, comment value 8k3R  (hidden comment: 8k3 ohm 0.1%)
Manufacturer: Panasonic; Manufacturer Part Number: ERJ-PB6B8201V; ComponentLink1Description: Manufacturer 1 Product Page; ComponentLink2Description: Manufacturer 1 Product Datasheet 1; ComponentLink3Description: Supplier 1 Product Page; ComponentLink4Description: Supplier 1 Product Datasheet 1; Category: Resistor; Supplier 1: Mouser; Resistance: 8k3R; ComponentLink5Description: Manufacturer 2 Product Page; ComponentLink6Description: Manufacturer 2 Product Datasheet 1; ComponentLink7Description: Supplier 2 Product Page; ComponentLink8Description: Supplier 2 Product Datasheet 1; ComponentLink5URL: k; ComponentLink6URL: k; ComponentLink7URL: k; ComponentLink8URL: k
simulation model RESISTOR (Resistor)
signal-integrity model Res
footprint RESC1608M (Chip Resistor, Body 1.6x0.8mm, IPC Low Density)
footprint RESC0603M (Footprint not found)
footprint RESC1005M (Footprint not found)
footprint RESC2012M (Chip Resistor, Body 2.0x1.3mm, IPC Low Density)
footprint RESC3216M (Chip Resistor, Body 3.2x1.6mm, IPC Low Density)
footprint RESC3225M (Chip Resistor, Body 3.2x2.5mm, IPC Low Density)
footprint RESC4532M (Chip Resistor, Body 4.5x3.2mm, IPC Low Density)
footprint RESC5025M (Chip Resistor, Body 5.0x2.5mm, IPC Low Density)
footprint RESC6332M (Chip Resistor, Body 6.3x3.2mm, IPC Low Density)
footprint RESC1005N
pins: 1, 2

## RES_SMD_4_1_16
designator R?, comment value 2k7R  (hidden comment: 2.7k ohm 0.1%)
Manufacturer: Panasonic; Manufacturer Part Number: ERJ-PB6B2701V; ComponentLink1Description: Manufacturer 1 Product Page; ComponentLink2Description: Manufacturer 1 Product Datasheet 1; ComponentLink3Description: Supplier 1 Product Page; ComponentLink4Description: Supplier 1 Product Datasheet 1; Category: Resistor; Supplier 1: Mouser; Resistance: 2k7R; ComponentLink5Description: Manufacturer 2 Product Page; ComponentLink6Description: Manufacturer 2 Product Datasheet 1; ComponentLink7Description: Supplier 2 Product Page; ComponentLink8Description: Supplier 2 Product Datasheet 1; ComponentLink5URL: k; ComponentLink6URL: k; ComponentLink7URL: k; ComponentLink8URL: k
simulation model RESISTOR (Resistor)
signal-integrity model Res
footprint RESC1608M (Chip Resistor, Body 1.6x0.8mm, IPC Low Density)
footprint RESC0603M (Footprint not found)
footprint RESC1005M (Footprint not found)
footprint RESC2012M (Chip Resistor, Body 2.0x1.3mm, IPC Low Density)
footprint RESC3216M (Chip Resistor, Body 3.2x1.6mm, IPC Low Density)
footprint RESC3225M (Chip Resistor, Body 3.2x2.5mm, IPC Low Density)
footprint RESC4532M (Chip Resistor, Body 4.5x3.2mm, IPC Low Density)
footprint RESC5025M (Chip Resistor, Body 5.0x2.5mm, IPC Low Density)
footprint RESC6332M (Chip Resistor, Body 6.3x3.2mm, IPC Low Density)
footprint RESC1005N
pins: 1, 2

## RES_SMD_4_1_17
designator R?, comment value 5k6R  (hidden comment: 5.6k ohm 0.1%)
Manufacturer: Panasonic; Manufacturer Part Number: ERJ-PB6B5601V; ComponentLink1Description: Manufacturer 1 Product Page; ComponentLink2Description: Manufacturer 1 Product Datasheet 1; ComponentLink3Description: Supplier 1 Product Page; ComponentLink4Description: Supplier 1 Product Datasheet 1; Category: Resistor; Supplier 1: Mouser; Resistance: 5k6R; ComponentLink5Description: Manufacturer 2 Product Page; ComponentLink6Description: Manufacturer 2 Product Datasheet 1; ComponentLink7Description: Supplier 2 Product Page; ComponentLink8Description: Supplier 2 Product Datasheet 1; ComponentLink5URL: k; ComponentLink6URL: k; ComponentLink7URL: k; ComponentLink8URL: k
simulation model RESISTOR (Resistor)
signal-integrity model Res
footprint RESC1608M (Chip Resistor, Body 1.6x0.8mm, IPC Low Density)
footprint RESC0603M (Footprint not found)
footprint RESC1005M (Footprint not found)
footprint RESC2012M (Chip Resistor, Body 2.0x1.3mm, IPC Low Density)
footprint RESC3216M (Chip Resistor, Body 3.2x1.6mm, IPC Low Density)
footprint RESC3225M (Chip Resistor, Body 3.2x2.5mm, IPC Low Density)
footprint RESC4532M (Chip Resistor, Body 4.5x3.2mm, IPC Low Density)
footprint RESC5025M (Chip Resistor, Body 5.0x2.5mm, IPC Low Density)
footprint RESC6332M (Chip Resistor, Body 6.3x3.2mm, IPC Low Density)
footprint RESC1005N
pins: 1, 2

## RES_SMD_4_2
designator R?, comment Manufacturer Part Number: URG3216L-3500-L-T05  (hidden comment: RES SMD 3216mm (1206mil) 350Ohms 250mW 0.01% 2ppm/oC)
Manufacturer: Susumu; Value: 350R 0.01% 250mW; Resistance: 350R; ComponentLink1Description: Manufacturer 1 Product Page; ComponentLink1URL: k; ComponentLink2Description: Manufacturer 1 Product Datasheet 1; ComponentLink2URL: k; ComponentLink3Description: Supplier 1 Product Page; ComponentLink3URL: https://www.mouser.com/ProductDetail/Susumu/URG3216L-3500-L-T05?qs=bZr6mbWTK5mPEjoOIadgxA%3D%3D; ComponentLink4Description: Supplier 1 Product Datasheet 1; ComponentLink4URL: https://www.mouser.com/datasheet/3/826/1/n_catalog_partition03_en.pdf; Category: Resistor; Height: *; Tolerance: 0.01%; Power: 250mW; TempCo: 2ppm/oC
simulation model RESISTOR (Resistor)
signal-integrity model Res
footprint RESC1608M (Chip Resistor, Body 1.6x0.8mm, IPC Low Density)
footprint RESC0603M (Chip Resistor, Body 0.6x0.3mm, IPC Low Density)
footprint RESC1005M (Chip Resistor, Body 1.1x0.5mm, IPC Low Density)
footprint RESC2012M (Chip Resistor, Body 2.0x1.3mm, IPC Low Density)
footprint RESC3216M (Chip Resistor, Body 3.2x1.6mm, IPC Low Density)
footprint RESC3225M (Chip Resistor, Body 3.2x2.5mm, IPC Low Density)
footprint RESC4532M (Chip Resistor, Body 4.5x3.2mm, IPC Low Density)
footprint RESC5025M (Chip Resistor, Body 5.0x2.5mm, IPC Low Density)
footprint RESC6332M (Chip Resistor, Body 6.3x3.2mm, IPC Low Density)
footprint RESC1005N (Chip Resistor, Body 1.1x0.5mm, IPC Medium Density)
pins: 1, 2